# Altium schematic symbol library Robot.SchLib: 24 symbols
Pins are listed as number, name and electrical type; pins without a type are passive.

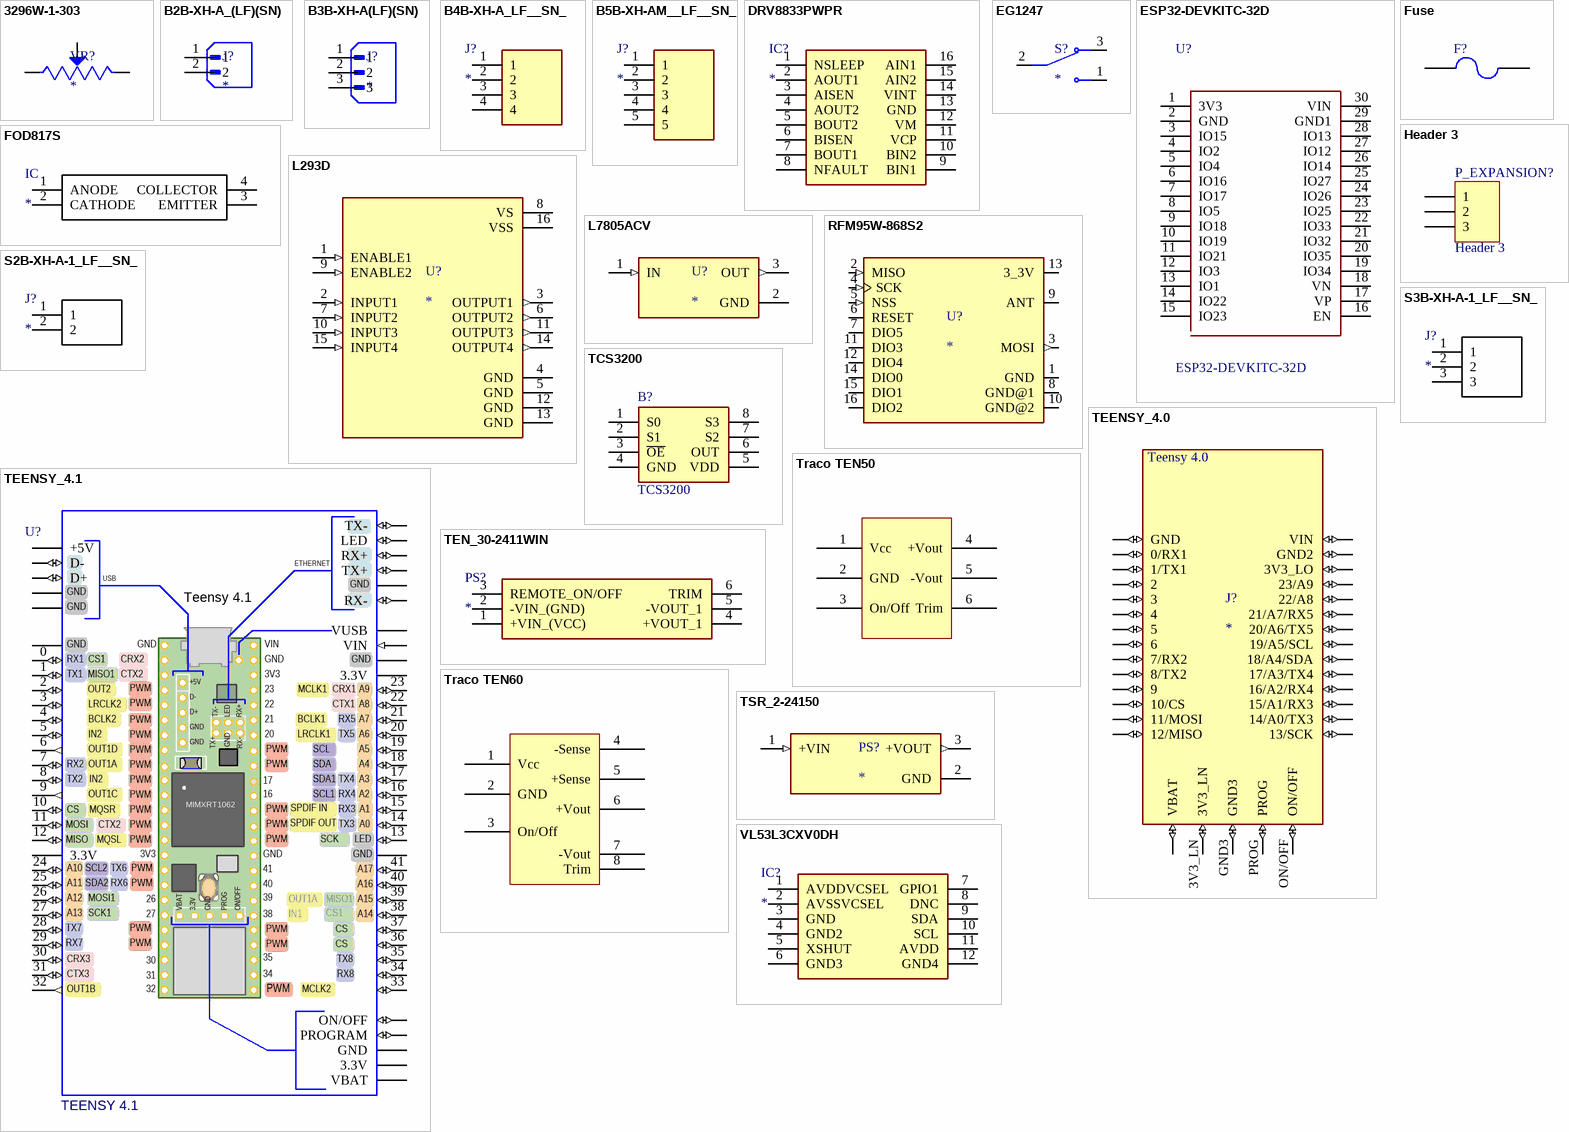
[diagram p0: symbols 3296W-1-303 to VL53L3CXV0DH]

## 3296W-1-303
designator VR?
TRIMMER - 3/8in SQ MT CERMET | Bourns 3296W-1-303; SnapEDA_Link: https://www.snapeda.com/parts/3296W-1-303/Bourns/view-part/?ref=snap; Package: NON STANDARD-3 Bourns; Value: *; MF: Bourns; MP: 3296W-1-303; Check_prices: https://www.snapeda.com/parts/3296W-1-303/Bourns/view-part/?ref=eda
footprint TRIM_3296W-1-303
pins: 1 CCW, 2 WIPER, 3 CW

## B2B-XH-A_(LF)(SN)
designator J?
Connector Header Through Hole 2 position 0.098 (2.50mm); MF: JST Sales; MP: B2B-XH-A (LF)(SN); SnapEDA_Link: https://www.snapeda.com/parts/B2B-XH-A%20(LF)(SN)/JST+Sales+America+Inc./view-part/?ref=snap; Package: None; Value: *; Check_prices: https://www.snapeda.com/parts/B2B-XH-A%20(LF)(SN)/JST+Sales+America+Inc./view-part/?ref=eda
footprint JST_B2B-XH-A_(LF)(SN)
pins: 1, 2

## B3B-XH-A(LF)(SN)
designator J?
Connector Header Through Hole 3 position 0.098 (2.50mm); MF: JST Sales; MP: B3B-XH-A(LF)(SN); SnapEDA_Link: https://www.snapeda.com/parts/B3B-XH-A(LF)(SN)/JST+Sales+America+Inc./view-part/?ref=snap; Package: None; Value: *; Check_prices: https://www.snapeda.com/parts/B3B-XH-A(LF)(SN)/JST+Sales+America+Inc./view-part/?ref=eda
footprint JST_B3B-XH-A(LF)(SN)
pins: 1, 2, 3

## B4B-XH-A_LF__SN_
designator J?
Connector; Manufacturer_Name: JST (JAPAN SOLDERLESS TERMINALS); Manufacturer_Part_Number: B4B-XH-A(LF)(SN); Datasheet Link: https://datasheet.lcsc.com/szlcsc/JST-Sales-America-B4B-XH-A-LF-SN_C144395.pdf; Height: 7mm; Arrow Part Number: B4B-XH-A(LF)(SN); Arrow Price/Stock: https://www.arrow.com/en/products/b4b-xh-a-lf-sn/jst-manufacturing?region=europe
footprint B4BXHALFSN (Connecteur 4)
pins: 1, 2, 3, 4

## B5B-XH-AM__LF__SN_
designator J?
Connector; Manufacturer_Name: JST (JAPAN SOLDERLESS TERMINALS); Manufacturer_Part_Number: B5B-XH-AM (LF)(SN); Datasheet Link: http://uk.rs-online.com/web/p/products/1755317; Height: 7mm; Arrow Part Number: B5B-XH-AM (LF)(SN); Arrow Price/Stock: https://www.arrow.com/en/products/b5b-xh-am-lf-sn/jst-manufacturing
footprint B5BXHAMLFSN (Connecteur 5)
pins: 1, 2, 3, 4, 5

## DRV8833PWPR
designator IC?
Motor driver; Manufacturer_Name: Texas Instruments; Manufacturer_Part_Number: DRV8833PWPR; Datasheet Link: http://www.ti.com/lit/gpn/drv8833; Height: 1.2mm; Mouser Part Number: 595-DRV8833PWPR; Mouser Price/Stock: https://www.mouser.co.uk/ProductDetail/Texas-Instruments/DRV8833PWPR?qs=luhu8ESwuKxT62RV9jrJTg%3D%3D; Arrow Part Number: DRV8833PWPR; Arrow Price/Stock: https://www.arrow.com/en/products/drv8833pwpr/texas-instruments.html?utm_currency=USD&region=nac
footprint SOP65P640X120-16N
pins: 1 NSLEEP, 2 AOUT1, 3 AISEN, 4 AOUT2, 5 BOUT2, 6 BISEN, 7 BOUT1, 8 NFAULT, 9 BIN1, 10 BIN2, 11 VCP, 12 VM, 13 GND, 14 VINT, 15 AIN2, 16 AIN1

## EG1247
designator S?
Slide Switch SPDT Through Hole, Right Angle; MF: E-Switch; MP: EG1247; Availability: In Stock; Value: *; Price: None; Check_prices: https://www.snapeda.com/parts/EG1247/E-Switch/view-part/?ref=eda; Purchase-URL: https://pricing.snapeda.com/search/part/EG1247/?ref=eda; SnapEDA_Link: https://www.snapeda.com/parts/EG1247/E-Switch/view-part/?ref=snap; Package: None
footprint EG1247 (Slide Switch SPDT Through Hole, Right Angle)
pins: 1, 2, 3

## ESP32-DEVKITC-32D
designator U?
Eval Board For Esp-Wroom-32; MF: Espressif Systems; Availability: Unavailable; Package: None; SnapEDA_Link: https://www.snapeda.com/parts/ESP32-DEVKITC-32D/Espressif%20Systems/view-part/?ref=snap; MP: ESP32-DEVKITC-32D; Price: None; Value: *
footprint ESP32-DEVKITV1
pins: 1 3V3, 2 GND, 3 IO15, 4 IO2, 5 IO4, 6 IO16, 7 IO17, 8 IO5, 9 IO18, 10 IO19, 11 IO21, 12 IO3, 13 IO1, 14 IO22, 15 IO23, 16 EN, 17 VP, 18 VN, 19 IO34, 20 IO35, 21 IO32, 22 IO33, 23 IO25, 24 IO26, 25 IO27, 26 IO14, 27 IO12, 28 IO13, 29 GND1, 30 VIN

## FOD817S
designator IC
Optocoupleur; Manufacturer_Name: ON Semiconductor; Manufacturer_Part_Number: FOD817S; Datasheet Link: https://componentsearchengine.com/Datasheets/1/FOD817S.pdf; Height: 3.85mm; Arrow Part Number: FOD817S; Arrow Price/Stock: https://www.arrow.com/en/products/fod817s/on-semiconductor; Mouser Part Number: 512-FOD817S; Mouser Price/Stock: https://www.mouser.co.uk/ProductDetail/ON-Semiconductor-Fairchild/FOD817S?qs=32VJUWvZ7Xab7eM00K2DFA%3D%3D
footprint FOD817S (Optocoupleur)
pins: 1 ANODE, 2 CATHODE, 3 EMITTER, 4 COLLECTOR

## Fuse
designator F?
Fuse; Published: 8-Jun-2000; LatestRevisionDate: 17-Jul-2002; LatestRevisionNote: Re-released for DXP Platform.; PackageReference: PIN-W2/E2.8; Publisher: Altium Limited; PackageDescription: Thru-Hole; 2 Leads
footprint Fuse (Thru-Hole; 2 Leads)
simulation model FUSE (Spice Subcircuit)
pins: 1, 2

## Header 3
designator P_EXPANSION?
Header, 3-Pin; LatestRevisionDate: 17-Jul-2002; LatestRevisionNote: Re-released for DXP Platform.; Publisher: Altium Limited
footprint JST_B3B-XH-A(LF)(SN)
pins: 1, 2, 3

## L293D
designator U?
Bipolar Motor Driver - Parallel 16-PowerDIP; MP: L293D; MF: STMicroelectronics; Package: DIP-16 STMicroelectronics; SnapEDA_Link: https://www.snapeda.com/parts/L293D/STMicroelectronics/view-part/?ref=snap; Purchase-URL: https://pricing.snapeda.com/search/part/L293D/?ref=eda; Check_prices: https://www.snapeda.com/parts/L293D/STMicroelectronics/view-part/?ref=eda; Availability: In Stock; Value: *; Price: None
footprint L293D (Bipolar Motor Driver - Parallel 16-PowerDIP)
pins: 1 ENABLE1 (in), 2 INPUT1 (in), 3 OUTPUT1 (out), 4 GND (power), 5 GND (power), 6 OUTPUT2 (out), 7 INPUT2 (in), 8 VS (power), 9 ENABLE2 (in), 10 INPUT3 (in), 11 OUTPUT3 (out), 12 GND (power), 13 GND (power), 14 OUTPUT4 (out), 15 INPUT4 (in), 16 VSS (power)

## L7805ACV
designator U?
Linear Voltage Regulator IC Positive Fixed 1 Output 1.5A TO-220; MF: STMicroelectronics; MP: L7805ACV; SnapEDA_Link: https://www.snapeda.com/parts/L7805ACV/STMicroelectronics/view-part/?ref=snap; Package: TO-220-3 STMicroelectronics; Value: *; Check_prices: https://www.snapeda.com/parts/L7805ACV/STMicroelectronics/view-part/?ref=eda
footprint L7805ACV (Linear Voltage Regulator IC Positive Fixed 1 Output 1.5A TO-220)
pins: 1 IN (in), 2 GND (power), 3 OUT (out)

## RFM95W-868S2
designator U?
LoRa Transceiver Module 868MHz Antenna Not Included Surface Mount; MF: RF; MP: RFM95W-868S2; Package: Non Standard RF Solutions; Price: None; Check_prices: https://www.snapeda.com/parts/RFM95W-868S2/RF+Solutions/view-part/?ref=eda; Value: *; SnapEDA_Link: https://www.snapeda.com/parts/RFM95W-868S2/RF+Solutions/view-part/?ref=snap; Availability: In Stock; Purchase-URL: https://pricing.snapeda.com/search?q=RFM95W-868S2&ref=eda
footprint XCVR_RFM95W-868S2 (LoRa Transceiver Module 868MHz Antenna Not Included Surface Mount)
pins: 1 GND (power), 2 MISO (in), 3 MOSI (out), 4 SCK (in), 5 NSS (in), 6 RESET (io), 7 DIO5 (io), 8 GND@1 (power), 9 ANT, 10 GND@2 (power), 11 DIO3 (io), 12 DIO4 (io), 13 3_3V (power), 14 DIO0 (io), 15 DIO1 (io), 16 DIO2 (io)

## S2B-XH-A-1_LF__SN_
designator J?
Connector; Manufacturer_Name: JST (JAPAN SOLDERLESS TERMINALS); Manufacturer_Part_Number: S2B-XH-A-1(LF)(SN); Datasheet Link: http://www.jst-mfg.com/product/pdf/eng/eXH.pdf; Height: 6.1mm; Arrow Part Number: S2B-XH-A-1(LF)(SN)
footprint S2B-XH-A
pins: 1, 2

## S3B-XH-A-1_LF__SN_
designator J?
Connector; Manufacturer_Name: JST Sales America; Manufacturer_Part_Number: S3B-XH-A-1(LF)(SN); Datasheet Link: http://www.jst-mfg.com/product/pdf/eng/eXH.pdf?5de523f84a15d; Height: 6.1mm; Arrow Part Number: S3B-XH-A-1(LF)(SN)
footprint S3B-XH-A
pins: 1, 2, 3

## TCS3200
designator B?
High-Resolution Conversion of Light Intensity to Frequency  Programmable Color and Full-Scale Output Frequency  Communicates Directly With a Microcontroller  Single-Supply Operation (2.7 V to 5.5 V)  Power Down Feature  Nonlinearity Error Typically 0.2% at 50 kHz; Manufacturer_Name: ams OSRAM; Geometry.Height: 1.75mm; Manufacturer_Part_Number: TCS3200; Mouser Part Number: N/A; Mouser Price/Stock: https://www.mouser.co.uk/ProductDetail/ams-OSRAM/TCS3200?qs=N6LLV8I65%252BcsUeP7A1YMoQ%3D%3D; Arrow Part Number: *; Arrow Price/Stock: *; Datasheet Link: https://ams.com/documents/20143/36005/TCS3200_DS000107_3-00.pdf/c53d702f-63aa-eda1-745f-d513aa4f535f
footprint TCS3200 (High-Resolution Conversion of Light Intensity to Frequency  Programmable Color and Full-Scale Output Frequency  Communicates Directly With a Microcontroller  Single-Supply Operation (2.7 V to 5.5 V)  Power Down Feature  Nonlinearity Error Typically 0.2% at 50 kHz)
pins: 1 S0, 2 S1, 3 ~{OE}, 4 GND, 5 VDD, 6 OUT, 7 S2, 8 S3

## TEENSY_4.0
designator J?
MF: PJRC; MP: Teensy 4.0; SnapEDA_Link: https://www.snapeda.com/parts/Teensy%204.0/PJRC/view-part/?ref=snap; Package: None; Value: *; Check_prices: https://www.snapeda.com/parts/Teensy%204.0/PJRC/view-part/?ref=eda
footprint TEENSY_4.0
pins: 0/RX 0/RX1 (io), 1/TX 1/TX1 (io), 2 (io), 3/CANTX 3 (io), 3V3_LN (io), 3V3_LO (io), 4/CANRX 4 (io), 5 (io), 6 (io), 7 7/RX2 (io), 8 8/TX2 (io), 9/CS 9 (io), 10/CS (io), 11/MOSI (io), 12/MISO (io), 13/SCK (io), 14/A0 14/A0/TX3 (io), 15/A1 15/A1/RX3 (io), 16/A2 16/A2/RX4 (io), 17/A3 17/A3/TX4 (io), 18/A4/SDA (io), 19/A5/SCL (io), 20/A6 20/A6/TX5 (io), 21/A7 21/A7/RX5 (io), 22/A8 (io), 23/A9 (io), GND (io), GND2 (io), GND3 (io), ON/OFF (io), PROG (io), VBAT\ VBAT (io), VIN (io)

## TEENSY_4.1
designator U?  value TEENSY 4.1
RT1062 Teensy 4.1 w/ Headers RT1062 600 MHZ; Manufacturer: PJRC; Manufacturer_Part_Number: DEV-16996; ComponentLink1Description: pin_function_front; ComponentLink1URL: https://www.pjrc.com/teensy/card11a_rev4_web.pdf; ComponentLink2Description: pin_function_back; ComponentLink2URL: https://www.pjrc.com/teensy/card11b_rev4_web.pdf; ComponentLink3Description: Digikey; ComponentLink3URL: https://www.digikey.com/en/products/detail/sparkfun-electronics/16996/13158152; ComponentLink4Description: Datasheet; ComponentLink4URL: https://mm.digikey.com/Volume0/opasdata/d220001/medias/docus/2942/DEV-16996_Web.pdf
footprint Teensy_4.1
pins: 0 RX1 (io), 1 TX1 (io), 2 OUT2 (io), 3 LRCLK2 (io), 3.3V_1 3.3V (power), 3.3V_2 3.3V (power), 3.3V_3 3.3V (power), 4 BCLK2 (io), 5 IN2 (io), 5V +5V (power), 6 OUT1D (out), 7 RX2 (io), 8 TX2 (io), 9 OUT1C (out), 10 CS1 (io), 11 MOSI (io), 12 MISO (io), 13 SCK (io), 14 A0 (io), 15 A1 (io), 16 A2 (io), 17 A3 (io), 18 A4 (io), 19 A5 (io), 20 A6 (io), 21 A7 (io), 22 A8 (io), 23 A9 (io), 24 A10 (io), 25 A11 (io), 26 A12 (io), 27 A13 (io), 28 RX7 (io), 29 TX7 (io), 30 CRX3 (io), 31 CTX3 (io), 32 OUT1B (out), 33 MCLK2 (io), 34 RX8 (io), 35 TX8 (io), 36 CS2 (io), 37 CS3 (io), 38 A14 (io), 39 A15 (io), 40 A16 (io), 41 A17 (io), D+ (io), D- (io), GND1 GND (power), GND2 GND (power), GND3 GND (power), GND4 GND (power), GND5 GND (power), LED (io), ON/OFF (io), PROGRAM (io), RX+ (io), RX- (io), TX+ (io), TX- (io), USB_GND1 USB_GND (power), USB_GND2 USB_GND (power), VBAT, VIN (in), VUSB
text: ETHERNET; USB; Teensy 4.1; CRX2; MISO1; CTX2; 3V3; PWM; MCLK1; CRX1; CTX1; BCLK1; RX5; LRCLK1; TX5; SCL; OUT1A; SDA; SDA1; TX4; SCL1; RX4; MIMXRT1062; CS; MQSR; SPDIF IN; RX3; SPDIF OUT; TX3; MQSL; SCL2; TX6; SDA2; RX6; MOSI1; PROG; SCK1; IN1

## TEN_30-2411WIN
designator PS?
Power Supply; Manufacturer_Name: Traco Power; Manufacturer_Part_Number: TEN 30-2411WIN; Description: 30 Watt DC/DC converter; Datasheet Link: https://tracopower.com/ten30win-datasheet/; Height: 10.7mm; Mouser Part Number: 495-TEN-30-2411WIN; Mouser Price/Stock: https://www.mouser.co.uk/ProductDetail/TRACO-Power/TEN-30-2411WIN?qs=ckJk83FOD0WILf%252BNmub5Yg%3D%3D
footprint TEN302411WIN
pins: 1 +VIN_(VCC), 2 -VIN_(GND), 3 REMOTE_ON/OFF, 4 +VOUT_1, 5 -VOUT_1, 6 TRIM

## Traco TEN50
designator TEN50-1, comment TEN50
Convertisseur de tension; LatestRevisionDate: 17-Jul-2002; LatestRevisionNote: Re-released for DXP Platform.; Publisher: Altium Limited
signal-integrity model Connector
footprint TRACO_2x1inch (Convertisseur de tension)
pins: 1 Vcc, 2 GND, 3 On/Off, 4 +Vout, 5 -Vout, 6 Trim

## Traco TEN60
designator TEN60-1, comment TEN60
Convertisseur de tension; LatestRevisionDate: 17-Jul-2002; LatestRevisionNote: Re-released for DXP Platform.; Publisher: Altium Limited
signal-integrity model Connector
footprint TRACO_2x2inch (Convertisseur de tension)
pins: 1 Vcc, 2 GND, 3 On/Off, 4 -Sense, 5 +Sense, 6 +Vout, 7 -Vout, 8 Trim

## TSR_2-24150
designator PS?
2 Amp POL switching regulator, wide input range, pos.-pos. circuit, LM78 compatible, SIP-3; MF: Traco Power; MP: TSR 2-24150; SnapEDA_Link: https://www.snapeda.com/parts/TSR%202-24150/Traco+Power/view-part/?ref=snap; Package: SIP-3 Traco Power; Value: *; Check_prices: https://www.snapeda.com/parts/TSR%202-24150/Traco+Power/view-part/?ref=eda
footprint TSR-2
pins: 1 +VIN (in), 2 GND (power), 3 +VOUT (out)

## VL53L3CXV0DH
designator IC?
ToF capteur; Manufacturer_Name: STMicroelectronics; Manufacturer_Part_Number: VL53L3CXV0DH/1; Datasheet Link: https://www.st.com/resource/en/datasheet/vl53l3cx.pdf; Height: 1.4mm; Mouser Part Number: 511-VL53L3CXV0DH/1; Mouser Price/Stock: https://www.mouser.co.uk/ProductDetail/STMicroelectronics/VL53L3CXV0DH-1?qs=OlC7AqGiEDl6J00dxEJKnQ%3D%3D; Arrow Part Number: VL53L3CXV0DH/1; Arrow Price/Stock: https://www.arrow.com/en/products/vl53l3cxv0dh1/stmicroelectronics?region=nac
footprint VL53L3CXV0DH1
pins: 1 AVDDVCSEL, 2 AVSSVCSEL, 3 GND, 4 GND2, 5 XSHUT, 6 GND3, 7 GPIO1, 8 DNC, 9 SDA, 10 SCL, 11 AVDD, 12 GND4